# Altium integrated library CA-IS2092A.IntLib: 1 symbol
Pins are listed as number, name and electrical type; pins without a type are passive.

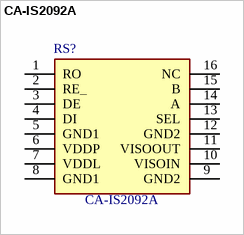
[diagram p0: symbol CA-IS2092A]

## CA-IS2092A
designator RS?
LGA-16(4.7x5.2) Isolated RS485 Transceivers (with Power) ROHS; Manufacturer_Name: ChipAnalog; Geometry.Height: 1.09mm; Manufacturer_Part_Number: CA-IS2092A; Mouser Part Number: *; Mouser Price/Stock: *; Arrow Part Number: *; Arrow Price/Stock: *; Datasheet Link: https://e.chipanalog.com/Public/Uploads/uploadfile/files/20250325/CAIS2062AdatasheetVersion1.01en20250325.pdf
footprint CAIS2062A
pins: 1 RO, 2 RE_, 3 DE, 4 DI, 5 GND1, 6 VDDP, 7 VDDL, 8 GND1, 9 GND2, 10 VISOIN, 11 VISOOUT, 12 GND2, 13 SEL, 14 A, 15 B, 16 NC